# Altium footprint library bs_libs.PcbLib: 125 footprints (part 6 of 8)
Each footprint in its own frame and in the unit in brackets; x right, y up, seen from the top. Pads: shape width x height; smd on the part's side, far side on the other; paste and mask are expansions set on the pad; w line width, h text height; cw(c..) or ccw(c..) is an arc to the next point about the centre after c.
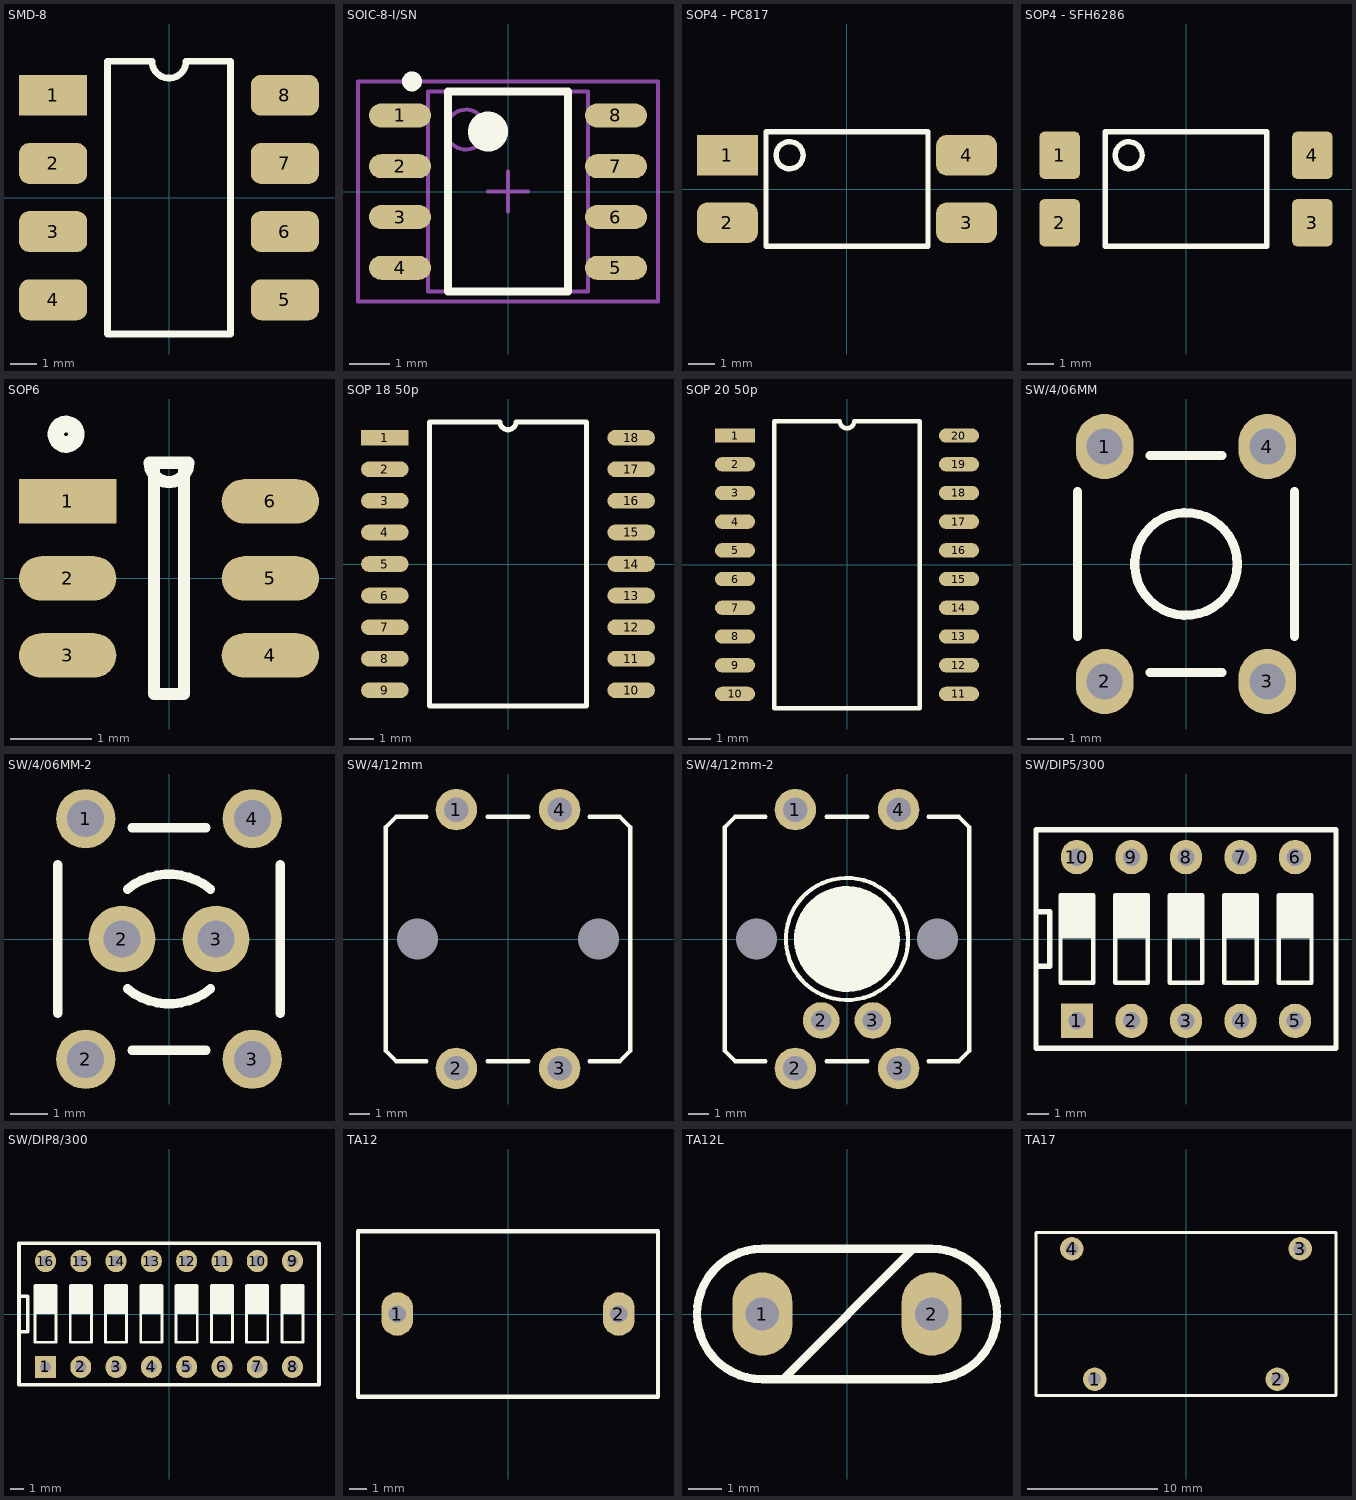
[diagram p5: the footprints below, top view; thin cyan lines are the x and y axes]

## SMD-8 [mil]
pads (8):
  rect 100x60 smd: 1(-170,150)
  rrect50% 100x60 smd: 2(-170,50) 3(-170,-50) 4(-170,-150) 5(170,-150) 6(170,-50) 7(170,50) 8(170,150)
Top Overlay:
  lines w10: -90,-200 90,-200 90,200 25,200 cw(c0,200) -25,200 -90,200 -90,-200

## SOIC-8-I/SN [mm] "SOIC, 8-Leads, Body 5.0x4.0mm (max), Pitch 1.27mm, IPC Medium Density"
height 1.75
pads (8):
  oval 1.55x0.6 smd: 1(-2.7,1.905) 2(-2.7,0.635) 3(-2.7,-0.635) 4(-2.7,-1.905) 5(2.7,-1.905) 6(2.7,-0.635) 7(2.7,0.635) 8(2.7,1.905)
Top Overlay:
  circle w0.6: c-0.5,1.5 r0.2
  circle w0.25: c-2.4,2.755 r0.125
  lines w0.2: -1.5,-2.5 1.5,-2.5 1.5,2.5 -1.5,2.5 -1.5,-2.5
Mechanical 13:
  circle w0.1: c-1.05,1.55 r0.5
  lines w0.1: -2,-2.5 2,-2.5 2,2.5 -2,2.5 -2,-2.5
Mechanical 15:
  lines w0.1: -0.5,0 0.5,0 ; 0,-0.5 0,0.5 ; -3.75,-2.75 3.75,-2.75 3.75,2.75 -3.75,2.75 -3.75,-2.75
3D body "User Library-SOIC-8-1.step": height 1.75, standoff 0, extent -3,-2.487 3,2.413

## SOP4 - PC817 [mil]
pads (4):
  rect 90x60 smd: 1(-177.17,50)
  rrect50% 90x60 smd: 2(-177.17,-50) 3(177.17,-50) 4(177.17,50)
Top Overlay:
  circle w8: c-85,50 r20
  lines w7.87: -120,-85 -120,85 120,85 120,-85 -120,-85
3D body "PC817 Optocoupler Gullwing SMD package.STEP": height 150.9, standoff -0.73, extent -196.84,-90.16 196.86,90.16

## SOP4 - SFH6286 [mil]
pads (4):
  rrect25% 60x70 smd: 1(-187.5,50) 2(-187.5,-50) 3(187.5,-50) 4(187.5,50)
Top Overlay:
  circle w8: c-85,50 r20
  lines w7.87: -120,-85 120,-85 120,85 -120,85 -120,-85
3D body "PC817 Optocoupler Gullwing SMD package.STEP": height 150.9, standoff -0.73, extent -196.84,-90.16 196.86,90.16

## SOP6 [mm]
pads (6):
  rect 1.2x0.55 smd: 1(-1.25,0.95)
  oval 1.2x0.55 smd: 2(-1.25,0) 3(-1.25,-0.95) 4(1.25,-0.95) 5(1.25,0) 6(1.25,0.95)
Top Overlay:
  circle w0.203: c-1.27,1.778 r0.127
  lines w0.152: -0.238,1.425 ccw(c0,1.425) 0.238,1.425 -0.185,1.425 -0.185,-1.425 0.185,-1.425 0.185,1.425 -0.238,1.425
3D body "User Library-IC SOT23-6-sot-23-6-2.step": height 1.09, standoff 0, extent -1.213,-1.397 1.213,1.397

## SOP 18 50p [mil]
pads (18):
  rect 75x25 smd: 1(-195,200)
  oval 75x25 smd: 2(-195,150) 3(-195,100) 4(-195,50) 5(-195,0) 6(-195,-50) 7(-195,-100) 8(-195,-150) 9(-195,-200) 10(195,-200) 11(195,-150) 12(195,-100) 13(195,-50) 14(195,0) 15(195,50) 16(195,100) 17(195,150) 18(195,200)
Top Overlay:
  lines w8: -124.5,-225 124.5,-225 124.5,225 12.5,225 cw(c0,225) -12.5,225 -124.5,225 -124.5,-225
3D body "User Library-SOIC18-300.step": height 104.33, standoff 0, extent -202.75,-226.97 202.76,226.97

## SOP 20 50p [mil]
pads (20):
  rect 70x25 smd: 1(-195,225)
  oval 70x25 smd: 2(-195,175) 3(-195,125) 4(-195,75) 5(-195,25) 6(-195,-25) 7(-195,-75) 8(-195,-125) 9(-195,-175) 10(-195,-225) 11(195,-225) 12(195,-175) 13(195,-125) 14(195,-75) 15(195,-25) 16(195,25) 17(195,75) 18(195,125) 19(195,175) 20(195,225)
Top Overlay:
  lines w8: -127,-250 127,-250 127,250 12.5,250 cw(c0,250) -12.5,250 -127,250 -127,-250
3D body "User Library-SOIC20.step": height 86.18, standoff -1.9, extent -199.49,-248.03 199.49,248.03

## SW/4/06MM [mm]
pads (4):
  oval 1.6x1.8 hole 1: 1(-2.25,3.25) 2(-2.25,-3.25) 3(2.25,-3.25) 4(2.25,3.25)
Top Overlay:
  circle w0.254: c0,0 r1.42
  lines w0.254: -3,-2 -3,2 ; -1,-3 1,-3 ; -1,3 1,3 ; 3,-2 3,2
3D body "User Library-Tactile switch 6x6x5mm.step": height 5.01, standoff -3.51, extent -3.015,-3.871 3.015,3.872

## SW/4/06MM-2 [mm]
pads (6):
  round 1.6 hole 1: 1(-2.25,3.25) 2(-2.25,-3.25) 3(2.25,-3.25) 4(2.25,3.25)
  round 1.8 hole 1: 2(-1.27,0) 3(1.27,0)
Top Overlay:
  lines w0.254: -3,-2 -3,2 ; -1.12,-1.344 ccw(c0,0) 1.12,-1.344 ; -1.12,1.344 cw(c0,0) 1.12,1.344 ; -1,-3 1,-3 ; -1,3 1,3 ; 3,-2 3,2
3D body "User Library-Tactile switch 6x6x5mm.step": height 5.01, standoff -3.51, extent -3.015,-3.871 3.015,3.872

## SW/4/12mm [mil]
pads (6):
  round 80 hole 47.24: 1(-100,250) 2(-100,-250) 3(100,-250) 4(100,250)
  round 0 hole 78.74: HOLE(-175,0) HOLE(175,0)
Top Overlay:
  lines w8: -157.48,-236.22 -216.54,-236.22 -236.22,-216.54 -236.22,216.54 -216.54,236.22 -157.48,236.22 ; -39.37,-236.22 39.37,-236.22 ; -39.37,236.22 39.37,236.22 ; 157.48,-236.22 216.54,-236.22 236.22,-216.54 236.22,216.54 216.54,236.22 157.48,236.22
3D body "User Library-Tact Switch 12x12x7 -SWT9-1.step": height 287.4, standoff -137.8, extent -236.22,-256.81 236.22,255

## SW/4/12mm-2 [mm]
pads (8):
  round 2.032 hole 1.2: 1(-2.54,6.35) 2(-2.54,-6.35) 3(2.54,-6.35) 4(2.54,6.35)
  round 1.8 hole 1: 2(-1.27,-4) 3(1.27,-4)
  round 0 hole 2: HOLE(-4.445,0) HOLE(4.445,0)
Top Overlay:
  circle w0.203: c0,0 r3
  circle w0.203: c0,0 r2.5
  region: -2.5,0 -2.5,0.246 -2.404,0.729 -2.215,1.184 -1.942,1.594 -1.594,1.942 -1.184,2.215 -0.729,2.404 -0.246,2.5 0,2.5 0.246,2.5 0.729,2.404 1.184,2.215 1.594,1.942 1.942,1.594 2.215,1.184 2.404,0.729 2.5,0.246 2.5,0 2.5,-0.246 2.404,-0.729 2.215,-1.184 1.942,-1.594 1.594,-1.942 1.184,-2.215 0.729,-2.404 0.246,-2.5 0,-2.5 -0.246,-2.5 -0.729,-2.404 -1.184,-2.215 -1.594,-1.942 -1.942,-1.594 -2.215,-1.184 -2.404,-0.729 -2.5,-0.246
  lines w0.203: -4,-6 -5.5,-6 -6,-5.5 -6,5.5 -5.5,6 -4,6 ; -1,-6 1,-6 ; -1,6 1,6 ; 4,-6 5.5,-6 6,-5.5 6,5.5 5.5,6 4,6
3D body "User Library-Tact Switch 12x12x7 -SWT9-1.step": height 7.3, standoff -3.5, extent -6,-6.523 6,6.477

## SW/DIP5/300 [mm]
pads (10):
  rect 1.5x1.6 hole 0.8: 1(-5.08,-3.81)
  oval 1.5x1.6 hole 0.8: 2(-2.54,-3.81) 3(0,-3.81) 4(2.54,-3.81) 5(5.08,-3.81) 6(5.08,3.81) 7(2.54,3.81) 8(0,3.81) 9(-2.54,3.81) 10(-5.08,3.81)
Top Overlay:
  region: 5.861,2.12 5.869,2.101 5.869,0.069 5.861,0.05 5.842,0.042 4.318,0.042 4.299,0.05 4.291,0.069 4.291,2.101 4.299,2.12 4.318,2.128 5.842,2.128
  region: -1.759,2.12 -1.751,2.101 -1.751,0.069 -1.759,0.05 -1.778,0.042 -3.302,0.042 -3.321,0.05 -3.329,0.069 -3.329,2.101 -3.321,2.12 -3.302,2.128 -1.778,2.128
  region: 0.781,2.12 0.789,2.101 0.789,0.069 0.781,0.05 0.762,0.042 -0.762,0.042 -0.781,0.05 -0.789,0.069 -0.789,2.101 -0.781,2.12 -0.762,2.128 0.762,2.128
  region: -4.299,2.12 -4.291,2.101 -4.291,0.069 -4.299,0.05 -4.318,0.042 -5.842,0.042 -5.861,0.05 -5.869,0.069 -5.869,2.101 -5.861,2.12 -5.842,2.128 -4.318,2.128
  region: 3.321,2.12 3.329,2.101 3.329,0.069 3.321,0.05 3.302,0.042 1.778,0.042 1.759,0.05 1.751,0.069 1.751,2.101 1.759,2.12 1.778,2.128 3.302,2.128
  lines w0.05: -5.842,0.069 -4.318,0.069 -4.318,2.101 -5.588,2.101 -5.842,2.101 -5.842,0.069 ; -3.302,0.069 -1.778,0.069 -1.778,2.101 -3.048,2.101 -3.302,2.101 -3.302,0.069 ; -0.762,0.069 -0.762,2.101 0.762,2.101 0.762,0.069 -0.762,0.069 ; 1.778,0.069 1.778,2.101 3.302,2.101 3.302,0.069 1.778,0.069 ; 4.318,0.069 4.318,2.101 4.572,2.101 5.842,2.101 5.842,0.069 4.318,0.069
  lines w0.203: -5.842,-2.032 -5.842,2.032 -4.318,2.032 -4.318,-2.032 -5.842,-2.032 ; -3.302,-2.032 -3.302,2.032 -1.778,2.032 -1.778,-2.032 -3.302,-2.032 ; -0.762,-2.032 0.762,-2.032 0.762,2.032 -0.762,2.032 -0.762,-2.032 ; 1.778,-2.032 3.302,-2.032 3.302,2.032 1.778,2.032 1.778,-2.032 ; 4.318,-2.032 5.842,-2.032 5.842,2.032 4.318,2.032 4.318,-2.032
  lines w0.254: -6.985,-1.27 -6.35,-1.27 -6.35,1.27 -6.985,1.27 ; -6.985,-5.08 -6.985,5.08 6.985,5.08 6.985,-5.08 -6.985,-5.08
3D body "User Library-Switch DIP 5 way flat slide Thru-Hole-19624.step": height 6, standoff -3.2, extent -7.13,-4.95 7.13,4.95

## SW/DIP8/300 [mm]
pads (16):
  rect 1.5x1.6 hole 0.8: 1(-8.89,-3.81)
  oval 1.5x1.6 hole 0.8: 2(-6.35,-3.81) 3(-3.81,-3.81) 4(-1.27,-3.81) 5(1.27,-3.81) 6(3.81,-3.81) 7(6.35,-3.81) 8(8.89,-3.81) 9(8.89,3.81) 10(6.35,3.81) 11(3.81,3.81) 12(1.27,3.81) 13(-1.27,3.81) 14(-3.81,3.81) 15(-6.35,3.81) 16(-8.89,3.81)
Top Overlay:
  drawing of 85 lines, arcs and shapes, not listed
3D body "User Library-DIP-Switch.step": height 7, standoff -3.7, extent -10.66,-4.95 10.66,4.95

## TA12 [mm]
pads (2):
  oval 1.8x2.5 hole 1: 1(-6.35,0) 2(6.35,0)
Top Overlay:
  lines w0.254: -8.6,-4.75 8.6,-4.75 8.6,4.75 -8.6,4.75 -8.6,-4.75
3D body "TA12.step": height 20.4, standoff 0, extent -8.6,-4.75 8.6,4.75

## TA12L [mm]
pads (2):
  oval 1.8x2.5 hole 1: 1(-2.54,0) 2(2.54,0)
Top Overlay:
  lines w0.254: -2,-1.96 -1.92,-1.96 2,1.96 ; -2.54,-1.96 cw(c-2.54,0) -2.54,1.96 2.54,1.96 cw(c2.54,0) 2.54,-1.96 -2.54,-1.96

## TA17 [mm]
pads (4):
  round 1.8 hole 1: 1(-7,-5) 2(7,-5) 3(8.75,5) 4(-8.75,5)
Top Overlay:
  lines w0.254: -11.5,-6.25 11.5,-6.25 11.5,6.25 -11.5,6.25 -11.5,-6.25
3D body "TA17.step": height 26, standoff 0, extent -11.5,-6.25 11.5,6.25